# EAGLE library part CH340C (library CH340C)
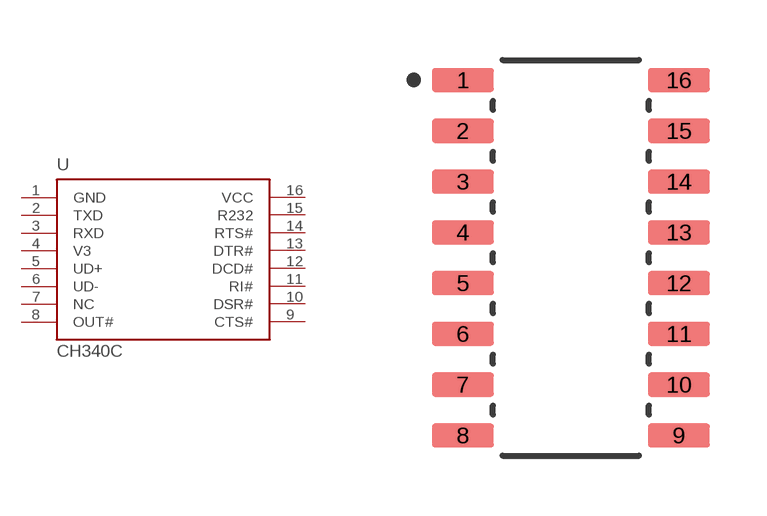
[diagram p0: symbol with the pads of C84681_SOP-16; footprint C84681_SOP-16]

Designator prefix U

## CH340C  [C84681_SOP-16]
1  GND
2  TXD
3  RXD
4  V3
5  UD+
6  UD-
7  NC
8  OUT#
9  CTS#
10  DSR#
11  RI#
12  DCD#
13  DTR#
14  RTS#
15  R232
16  VCC

## Footprint C84681_SOP-16 (pad centres in mm)
CH340C — Clean-Room IPC-7351B / JEDEC MS-012-AC
smd 1.55 x 0.6: 1 -2.7,4.445; 2 -2.7,3.175; 3 -2.7,1.905; 4 -2.7,0.635; 5 -2.7,-0.635; 6 -2.7,-1.905; 7 -2.7,-3.175; 8 -2.7,-4.445; 9 2.7,-4.445; 10 2.7,-3.175; 11 2.7,-1.905; 12 2.7,-0.635; 13 2.7,0.635; 14 2.7,1.905; 15 2.7,3.175; 16 2.7,4.445